# Altium footprint library Miscellaneous Devices.PcbLib: 306 footprints (part 4 of 20)
Each footprint in its own frame and in the unit in brackets; x right, y up, seen from the top. Pads: shape width x height; smd on the part's side, far side on the other; paste and mask are expansions set on the pad; w line width, h text height; cw(c..) or ccw(c..) is an arc to the next point about the centre after c.
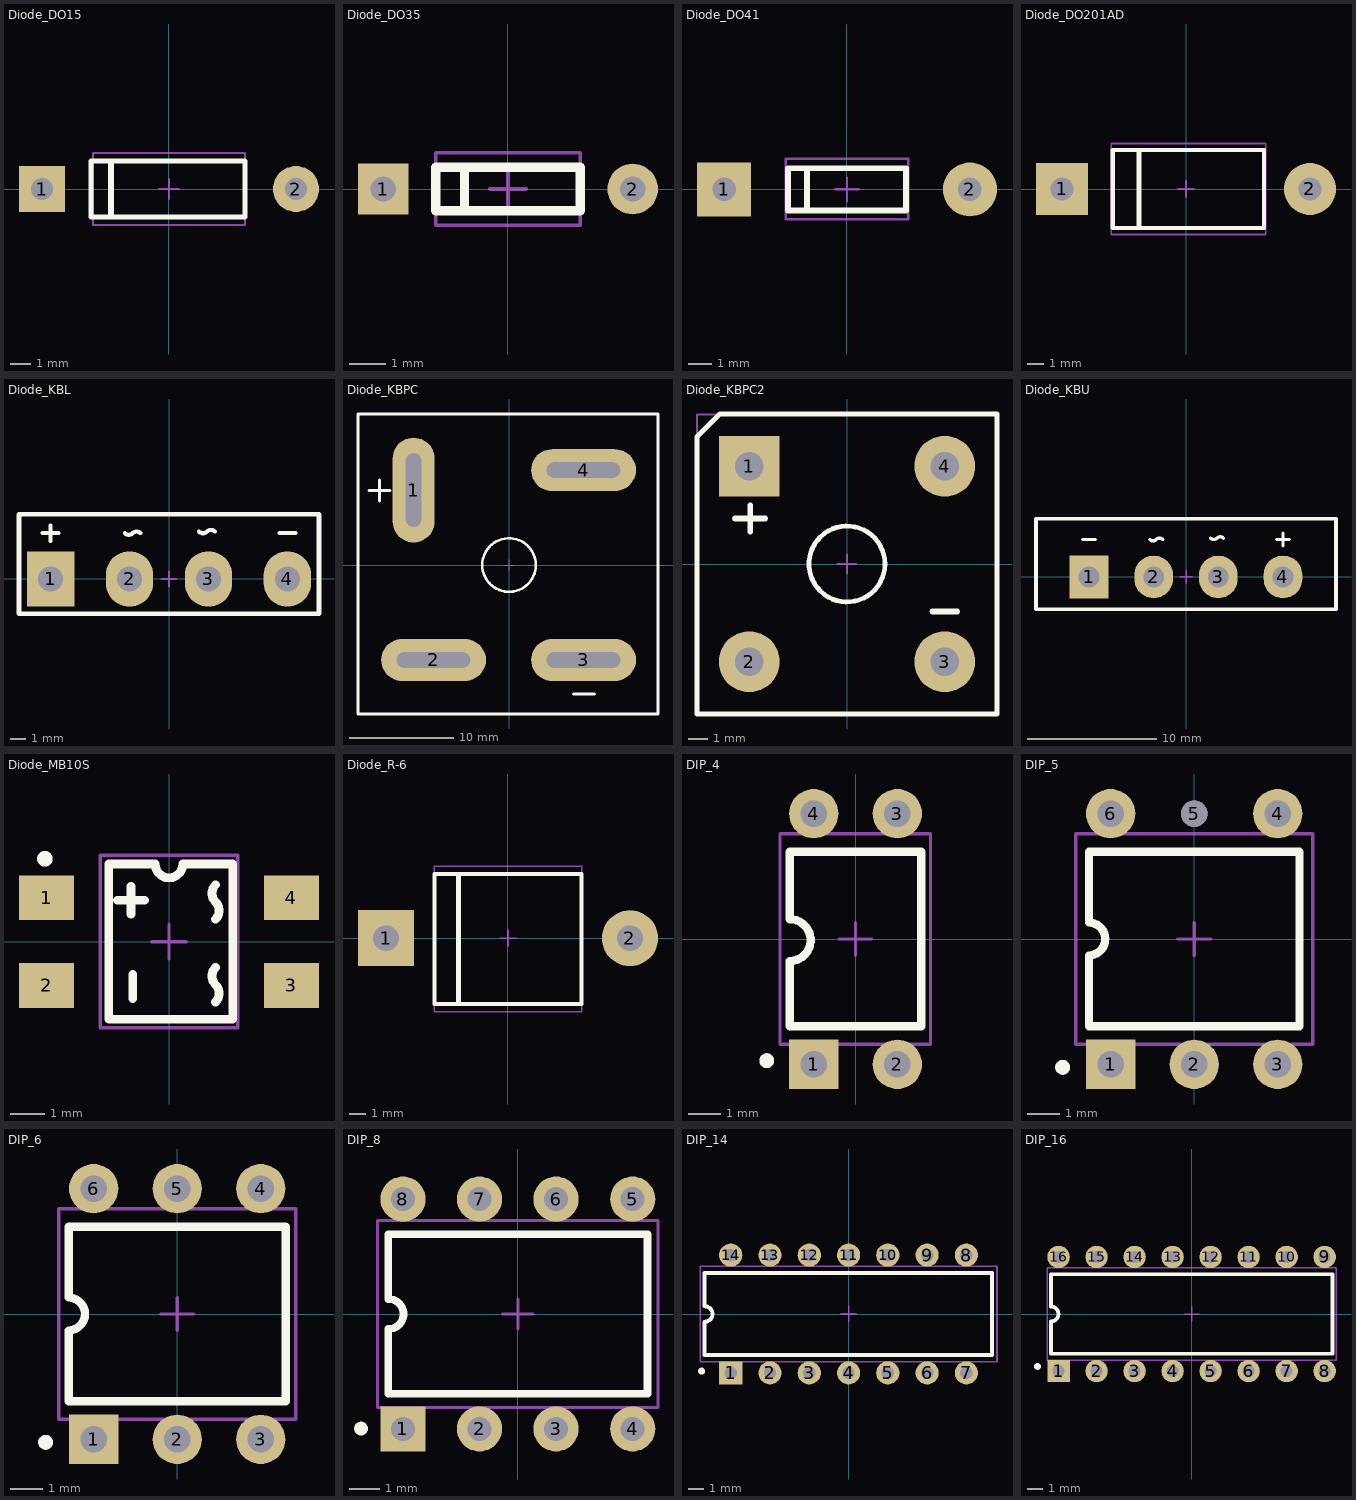
[diagram p3: the footprints below, top view; thin cyan lines are the x and y axes]

## Diode_DO15 [mm]
pads (2):
  rect 2.3x2.3 hole 1.1: 1(-6.35,0)
  round 2.3 hole 1.1: 2(6.35,0)
Top Overlay:
  lines w0.254: -3.9,-1.4 3.8,-1.4 3.8,1.4 -3.9,1.4 -3.9,-1.4
  lines w0.3: -2.9,-1.3 -2.9,1.3
Mechanical 15:
  lines w0.1: -0.5,0 0.5,0 ; 0,-0.5 0,0.5 ; -3.8,-1.8 -3.8,1.8 3.8,1.8 3.8,-1.8 -3.8,-1.8
3D body: height 3.58, standoff -3.2, extent -6.73,-1.76 6.83,1.8

## Diode_DO35 [mm]
pads (2):
  rect 1.4x1.4 hole 0.7: 1(-3.45,0)
  round 1.4 hole 0.7: 2(3.45,0)
Top Overlay:
  lines w0.254: -1.2,-0.6 -1.2,0.6 ; -2,-0.6 2,-0.6 2,0.6 -2,0.6 -2,-0.6
Mechanical 15:
  lines w0.1: -0.5,0 0.5,0 ; 0,-0.5 0,0.5 ; -2,-1 -2,1 2,1 2,-1 -2,-1
3D body: height 2.3, standoff -4.2, extent -3.75,-1 3.75,1

## Diode_DO41 [mm]
pads (2):
  rect 2.3x2.3 hole 1: 1(-5.23,0)
  round 2.3 hole 1: 2(5.23,0)
Top Overlay:
  lines w0.254: -1.7,-0.9 -1.7,0.9 ; -2.5,-0.9 -2.5,0.9 2.5,0.9 2.5,-0.9 -2.5,-0.9
Mechanical 15:
  lines w0.1: -0.5,0 0.5,0 ; 0,-0.5 0,0.5 ; -2.6,-1.265 2.6,-1.265 2.6,1.3 -2.6,1.3 -2.6,-1.265
3D body: height 2.55, standoff -2.54, extent -5.461,-1.265 5.461,1.3

## Diode_DO201AD [mm]
pads (2):
  rect 3.2x3.2 hole 1.4: 1(-7.62,0)
  round 3.2 hole 1.4: 2(7.62,0)
Top Overlay:
  lines w0.254: -4.5,-2.4 4.8,-2.4 4.8,2.4 -4.5,2.4 -4.5,-2.4
  lines w0.3: -2.9,-2.3 -2.9,2.3
Mechanical 15:
  lines w0.1: -0.5,0 0.5,0 ; 0,-0.5 0,0.5 ; -4.6,-2.8 -4.6,2.8 4.9,2.8 4.9,-2.8 -4.6,-2.8
3D body: height 5.6, standoff -6, extent -8.28,-2.8 8.28,2.8

## Diode_KBL [mm]
pads (4):
  rect 3x3.5 hole 1.6: 1(-7.5,0)
  oval 3x3.5 hole 1.6: 2(-2.5,0) 3(2.5,0) 4(7.5,0)
Top Overlay:
  lines w0.254: -8,2.9 -7,2.9 ; -7.5,2.4 -7.5,3.4 ; -2.8,2.9 ccw(c-2.55,3.15) -2.3,2.9 cw(c-2.05,2.65) -1.8,2.9 ; 1.9,3 ccw(c2.15,3.25) 2.4,3 cw(c2.65,2.75) 2.9,3 ; 7,2.9 8,2.9
  lines w0.3: -9.5,-2.2 -9.5,4.1 9.5,4.1 9.5,-2.2 -9.5,-2.2
Mechanical 15:
  lines w0.1: -0.5,0 0.5,0 ; 0,-0.5 0,0.5 ; -9.5,-2.151 9.5,-2.151 9.5,4.1 -9.5,4.1 -9.5,-2.151
3D body: height 15.75, standoff -4.5, extent -9.5,-2.151 9.5,4.1

## Diode_KBPC [mm]
pads (4):
  oval 4x10 hole 1.5 slot 7 at 90 deg: 1(-9.1,7.15)
  oval 10x4 hole 1.5 slot 7 at 0 deg: 2(-7.2,-9.05) 3(7.1,-9.05) 4(7.1,9.05)
Top Overlay:
  circle w0.254: c0,0 r2.555
  lines w0.254: -14.4,-14.2 14.2,-14.2 14.2,14.4 -14.4,14.4 -14.4,-14.2
  lines w0.3: -13.35,7.1 -11.35,7.1 ; -12.35,6.1 -12.35,8.1 ; 6.15,-12.3 8.15,-12.3
Mechanical 15:
  lines w0.1: -0.5,0 0.5,0 ; 0,-0.5 0,0.5 ; -14.4,-14.2 14.2,-14.2 14.2,14.4 -14.4,14.4 -14.4,-14.2
3D body: height 7.5, standoff -14.5, extent -14.4,-14.2 14.2,14.4

## Diode_KBPC2 [mm]
pads (4):
  rect 3.2x3.2 hole 1.5: 1(-5.15,5.15)
  round 3.2 hole 1.5: 2(-5.15,-5.15) 3(5.15,-5.15) 4(5.15,5.15)
Top Overlay:
  circle w0.254: c0,0 r2
  lines w0.254: -7.9,-7.9 7.9,-7.9 7.9,7.9 -6.7,7.9 -7.9,6.7 -7.9,-7.9
  lines w0.3: -5.9,2.4 -4.3,2.4 ; -5.1,1.7 -5.1,3.1 ; 4.5,-2.5 5.8,-2.5
Mechanical 15:
  lines w0.1: -0.5,0 0.5,0 ; 0,-0.5 0,0.5 ; -7.9,-7.875 -7.9,7.875 7.85,7.875 7.85,-7.875 -7.9,-7.875
3D body: height 6.33, standoff -2, extent -7.9,-7.875 7.85,7.875

## Diode_KBU [mm]
pads (4):
  rect 3x3.3 hole 1.6: 1(-7.5,0)
  oval 3x3.3 hole 1.6: 2(-2.5,0) 3(2.5,0) 4(7.5,0)
Top Overlay:
  lines w0.254: -8,2.9 -7,2.9 ; -2.8,2.9 ccw(c-2.55,3.15) -2.3,2.9 cw(c-2.05,2.65) -1.8,2.9 ; 1.9,3 ccw(c2.15,3.25) 2.4,3 cw(c2.65,2.75) 2.9,3 ; 7,2.9 8,2.9 ; 7.5,2.4 7.5,3.4
  lines w0.3: -11.6,-2.5 11.6,-2.5 11.6,4.5 -11.6,4.5 -11.6,-2.5
Mechanical 15:
  lines w0.1: -0.5,0 0.5,0 ; 0,-0.5 0,0.5 ; -11.6,-2.45 -11.6,4.5 11.6,4.5 11.6,-2.45 -11.6,-2.45
3D body: height 18.75, standoff -23.55, extent -11.6,-2.45 11.6,4.5

## Diode_MB10S [mm]
pads (4):
  rect 1.6x1.3 smd: 1(-3.55,1.27) 2(-3.55,-1.27) 3(3.55,-1.27) 4(3.55,1.27)
Top Overlay:
  circle w0.254: c-3.6,2.4 r0.1
  lines w0.254: -1.5,1.2 -0.7,1.2 ; -1.1,0.8 -1.1,1.6 ; -1.05,-1.65 -1.05,-0.95 ; 1.35,-1.75 ccw(c1.1,-1.5) 1.35,-1.25 cw(c1.6,-1) 1.35,-0.75 ; 1.35,0.65 ccw(c1.1,0.9) 1.35,1.15 cw(c1.6,1.4) 1.35,1.65 ; -1.75,-2.25 -1.75,2.25 -0.4,2.25 ccw(c0,2.25) 0.4,2.25 1.85,2.25 1.85,-2.25 -1.75,-2.25
Mechanical 15:
  lines w0.1: -0.5,0 0.5,0 ; 0,-0.5 0,0.5 ; -2,-2.5 -2,2.5 2,2.5 2,-2.5 -2,-2.5
3D body: height 2.9, standoff 0, extent -3.75,-2.45 3.85,2.45

## Diode_R-6 [mm]
pads (2):
  rect 3.5x3.5 hole 1.6: 1(-7.62,0)
  round 3.5 hole 1.6: 2(7.62,0)
Top Overlay:
  lines w0.254: -4.6,-4.1 4.6,-4.1 4.6,4 -4.6,4 -4.6,-4.1
  lines w0.3: -3.1,-4 -3.1,3.9
Mechanical 15:
  lines w0.1: -0.5,0 0.5,0 ; 0,-0.5 0,0.5 ; -4.6,-4.6 4.6,-4.6 4.6,4.5 -4.6,4.5 -4.6,-4.6
3D body: height 9.16, standoff -5.55, extent -8.27,-4.6 8.27,4.52

## DIP_4 [mm] "7.62"
pads (4):
  rect 1.5x1.5 hole 0.8: 1(-1.27,-3.81)
  round 1.5 hole 0.8: 2(1.27,-3.81) 3(1.27,3.81) 4(-1.27,3.81)
Top Overlay:
  circle w0.254: c-2.7,-3.7 r0.1
  lines w0.254: -2,-0.7 -2,-2.65 2,-2.65 2,2.65 -2,2.65 -2,0.6 cw(c-2,-0.035) -2,-0.67
Mechanical 15:
  lines w0.1: -0.5,0 0.5,0 ; 0,-0.5 0,0.5 ; -2.3,-3.2 -2.3,3.2 2.28,3.2 2.28,-3.2 -2.3,-3.2
3D body: height 4.5, standoff -2.8, extent -2.3,-3.935 2.28,3.935

## DIP_5 [mm] "7.62"
pads (6):
  rect 1.5x1.5 hole 0.8: 1(-2.54,-3.81)
  round 1.5 hole 0.8: 2(0,-3.81) 3(2.54,-3.81) 4(2.54,3.81) 6(-2.54,3.81)
  round 0.8 hole 0.8 unplated: 5(0,3.81)
Top Overlay:
  circle w0.254: c-4,-3.9 r0.1
  lines w0.254: -3.2,-2.65 -3.2,-0.5 ccw(c-3.204,0) -3.2,0.5 -3.2,2.65 3.2,2.65 3.2,-2.65 -3.2,-2.65
Mechanical 15:
  lines w0.1: -0.5,0 0.5,0 ; 0,-0.5 0,0.5 ; -3.6,-3.2 3.6,-3.2 3.6,3.2 -3.6,3.2 -3.6,-3.2
3D body: height 4.5, standoff -2.8, extent -3.56,-4 3.56,3.87

## DIP_6 [mm] "7.62"
pads (6):
  rect 1.5x1.5 hole 0.8: 1(-2.54,-3.81)
  round 1.5 hole 0.8: 2(0,-3.81) 3(2.54,-3.81) 4(2.54,3.81) 5(0,3.81) 6(-2.54,3.81)
Top Overlay:
  circle w0.254: c-4,-3.9 r0.1
  lines w0.254: -3.3,-2.65 -3.3,-0.5 ccw(c-3.304,0) -3.3,0.5 -3.3,2.65 3.3,2.65 3.3,-2.65 -3.3,-2.65
Mechanical 15:
  lines w0.1: -0.5,0 0.5,0 ; 0,-0.5 0,0.5 ; -3.6,-3.2 3.6,-3.2 3.6,3.2 -3.6,3.2 -3.6,-3.2
3D body: height 4.5, standoff -2.8, extent -3.56,-4 3.56,3.87

## DIP_8 [mm] "7.62"
pads (8):
  rect 1.5x1.5 hole 0.8: 1(-3.81,-3.81)
  round 1.5 hole 0.8: 2(-1.27,-3.81) 3(1.27,-3.81) 4(3.81,-3.81) 5(3.81,3.81) 6(1.27,3.81) 7(-1.27,3.81) 8(-3.81,3.81)
Top Overlay:
  circle w0.254: c-5.2,-3.8 r0.1
  lines w0.254: -4.3,-2.65 4.3,-2.65 4.3,2.65 -4.3,2.65 -4.3,0.5 cw(c-4.29,0) -4.3,-0.5 -4.3,-2.65
Mechanical 15:
  lines w0.1: -0.5,0 0.5,0 ; 0,-0.5 0,0.5 ; -4.65,-3.1 -4.65,3.1 4.65,3.1 4.65,-3.1 -4.65,-3.1
3D body: height 4.57, standoff -3.81, extent -4.955,-3.9 4.955,3.92

## DIP_14 [mm] "7.62"
pads (14):
  rect 1.5x1.5 hole 0.8: 1(-7.62,-3.81)
  round 1.5 hole 0.8: 2(-5.08,-3.81) 3(-2.54,-3.81) 4(0,-3.81) 5(2.54,-3.81) 6(5.08,-3.81) 7(7.62,-3.81) 8(7.62,3.81) 9(5.08,3.81) 10(2.54,3.81) 11(0,3.81) 12(-2.54,3.81) 13(-5.08,3.81) 14(-7.62,3.81)
Top Overlay:
  circle w0.254: c-9.5,-3.7 r0.1
  lines w0.254: -9.32,-2.65 9.28,-2.65 9.28,2.65 -9.32,2.65 -9.32,0.5 cw(c-9.3,0) -9.32,-0.5 -9.32,-2.65
Mechanical 15:
  lines w0.1: -9.6,-3.1 9.6,-3.1 9.6,3.1 -9.6,3.1 ; -9.591,-3.1 -9.591,3.1 ; -0.5,0 0.5,0 ; 0,-0.5 0,0.5
3D body: height 4.57, standoff -3.81, extent -9.691,-3.91 9.739,3.91

## DIP_16 [mm] "7.62"
pads (16):
  rect 1.5x1.5 hole 0.8: 1(-8.89,-3.81)
  round 1.5 hole 0.8: 2(-6.35,-3.81) 3(-3.81,-3.81) 4(-1.27,-3.81) 5(1.27,-3.81) 6(3.81,-3.81) 7(6.35,-3.81) 8(8.89,-3.81) 9(8.89,3.81) 10(6.35,3.81) 11(3.81,3.81) 12(1.27,3.81) 13(-1.27,3.81) 14(-3.81,3.81) 15(-6.35,3.81) 16(-8.89,3.81)
Top Overlay:
  circle w0.254: c-10.3,-3.5 r0.1
  lines w0.254: -9.39,-2.65 -9.39,-0.5 ccw(c-9.4,0) -9.39,0.5 -9.39,2.65 9.41,2.65 9.41,-2.65 -9.39,-2.65
Mechanical 15:
  lines w0.1: -0.5,0 0.5,0 ; 0,-0.5 0,0.5 ; -9.65,-3.1 -9.65,3.1 9.65,3.1 9.65,-3.1 -9.65,-3.1
3D body: height 4.57, standoff -3.81, extent -9.685,-3.9 9.745,3.92